# EAGLE library part 6103XX21121_61030621121 (library WR-PHD)
WR-PHD 2.54 mm SMT Dual Pin Header ARTICLE PROPERTIES: Pins:4;​ 6;​ 8;​ 10;​ 12;​ 14;​ 16;​ 20 KIND PROPERTIES: Pitch：2.54 mm Quality Class:3 as per CECC 75 301-802 Rows：Dual Gender：Pin Header Type：Straight MATERIAL PROPERTIES: Insulator Material :PA6T Insulator Flammability Rating:UL94 V-0 Contact Material:Copper Alloy Contact Plating:Gold Contact Type:Stamped GENERAL INFORMATION Operating Temperature:-40 up to +125 °C ELECTRICAL PROPERTIES: Rated Current:max. IR 1:3 A Withstanding Voltage:500 V (AC) Contact Resistance:20 mΩ RISO:1000 MΩ CERTIFICATION UL Approval:E323964 PACKAGING PROPERTIES Packaging:Tape and Reel with Cap <https://www.we-online.com/catalog/media/o33205v209%20Family_WR-PHD_610xxx21121.jpg> Details see: https://www.we-online.com/catalog/en/PHD_2_54_SMT_DUAL_PIN_HEADER_6100XX21121 Updated by Ella Wu 2021-11-04 2021 (C) Würth Elektronik
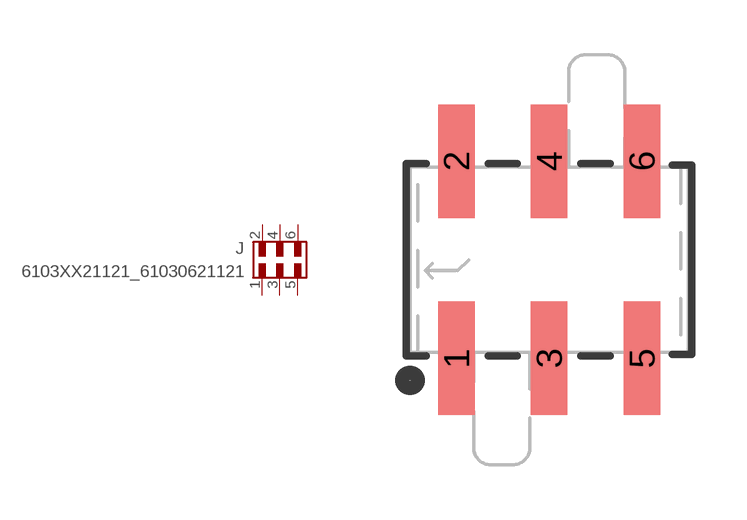
[diagram p142: symbol with the pads of 61030621121; footprint 61030621121]

Designator prefix J

## 6103XX21121_61030621121 (DATASHEET-URL: https://www.we-online.com/redexpert/spec/61030621121?ae; GENDER: Pin Header; IR: 3A; MOUNT: THT; PACKAGING: Tape and Reel with Cap; PART-NUMBER: 61030621121; PINS: 6; PITCH: 2.54 mm; ROWS: Dual; TYPE: Straight; VALUE: 61030621121)  [61030621121]
1  1  pas
2  2  pas
3  3  pas
4  4  pas
5  5  pas
6  6  pas

## Footprint 61030621121 (pad centres in mm)
WR-PHD 2.54 mm SMT Dual Pin Header (Reel), 6Pins
smd 1 x 3.1: 1 -2.54,-2.7; 2 -2.54,2.7; 3 0,-2.7; 4 0,2.7; 5 2.54,-2.7; 6 2.54,2.7